# EAGLE library part IC_MEM_24AA* (library dp_devices.v6)
I2C EEPROM
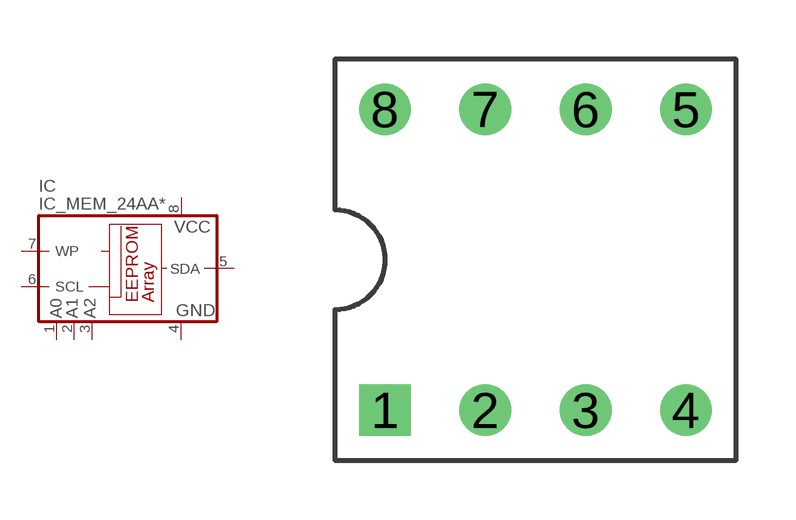
[diagram p53: symbol with the pads of DIP8; footprint DIP8]

Designator prefix IC

## IC_MEM_24AA-DIP8  [DIP8]
1  A0  in
2  A1  in
3  A2  in
4  GND  pwr
5  SDA
6  SCL  in
7  WP  in
8  VCC  pwr

## Footprint DIP8 (pad centres in mm)
drill 0.8 square: 1 -3.81,-3.81
drill 0.8: 2 -1.27,-3.81; 3 1.27,-3.81; 4 3.81,-3.81; 5 3.81,3.81; 6 1.27,3.81; 7 -1.27,3.81; 8 -3.81,3.81